# EAGLE library part MAX17225 (library madhu)
400mV to 5.5V Input, nanoPower Synchronous Boost Converter with True Shutdown
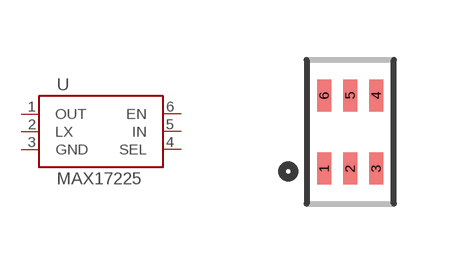
[diagram p27: symbol with the pads of DFN6; footprint DFN6]

Designator prefix U

## MAX17225ELT  [DFN6]
1  OUT
2  LX
3  GND  pwr
4  SEL
5  IN  pwr
6  EN

## Footprint DFN6 (pad centres in mm)
Maxim 2mm DFN6 https://pdfserv.maximintegrated.com/land_patterns/90-0004.PDF
smd 0.35 x 0.8: 1 -0.65,-0.915; 2 0,-0.915; 3 0.65,-0.915; 4 0.65,0.915; 5 0,0.915; 6 -0.65,0.915